# Altium schematic symbol library LUCID_LIGHT_Custom_LED.SchLib: 1 symbol
Pins are listed as number, name and electrical type; pins without a type are passive.

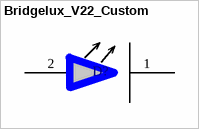
[diagram p0: symbol Bridgelux_V22_Custom]

## Bridgelux_V22_Custom
designator D?, comment On back of PCB  (value not drawn)
footprint Bridgelux_V22_Custom
pins: 1, 2